# Altium footprint library Electromechanicals.PcbLib: 25 footprints (part 1 of 2)
Each footprint in its own frame and in the unit in brackets; x right, y up, seen from the top. Pads: shape width x height; smd on the part's side, far side on the other; paste and mask are expansions set on the pad; w line width, h text height; cw(c..) or ccw(c..) is an arc to the next point about the centre after c.
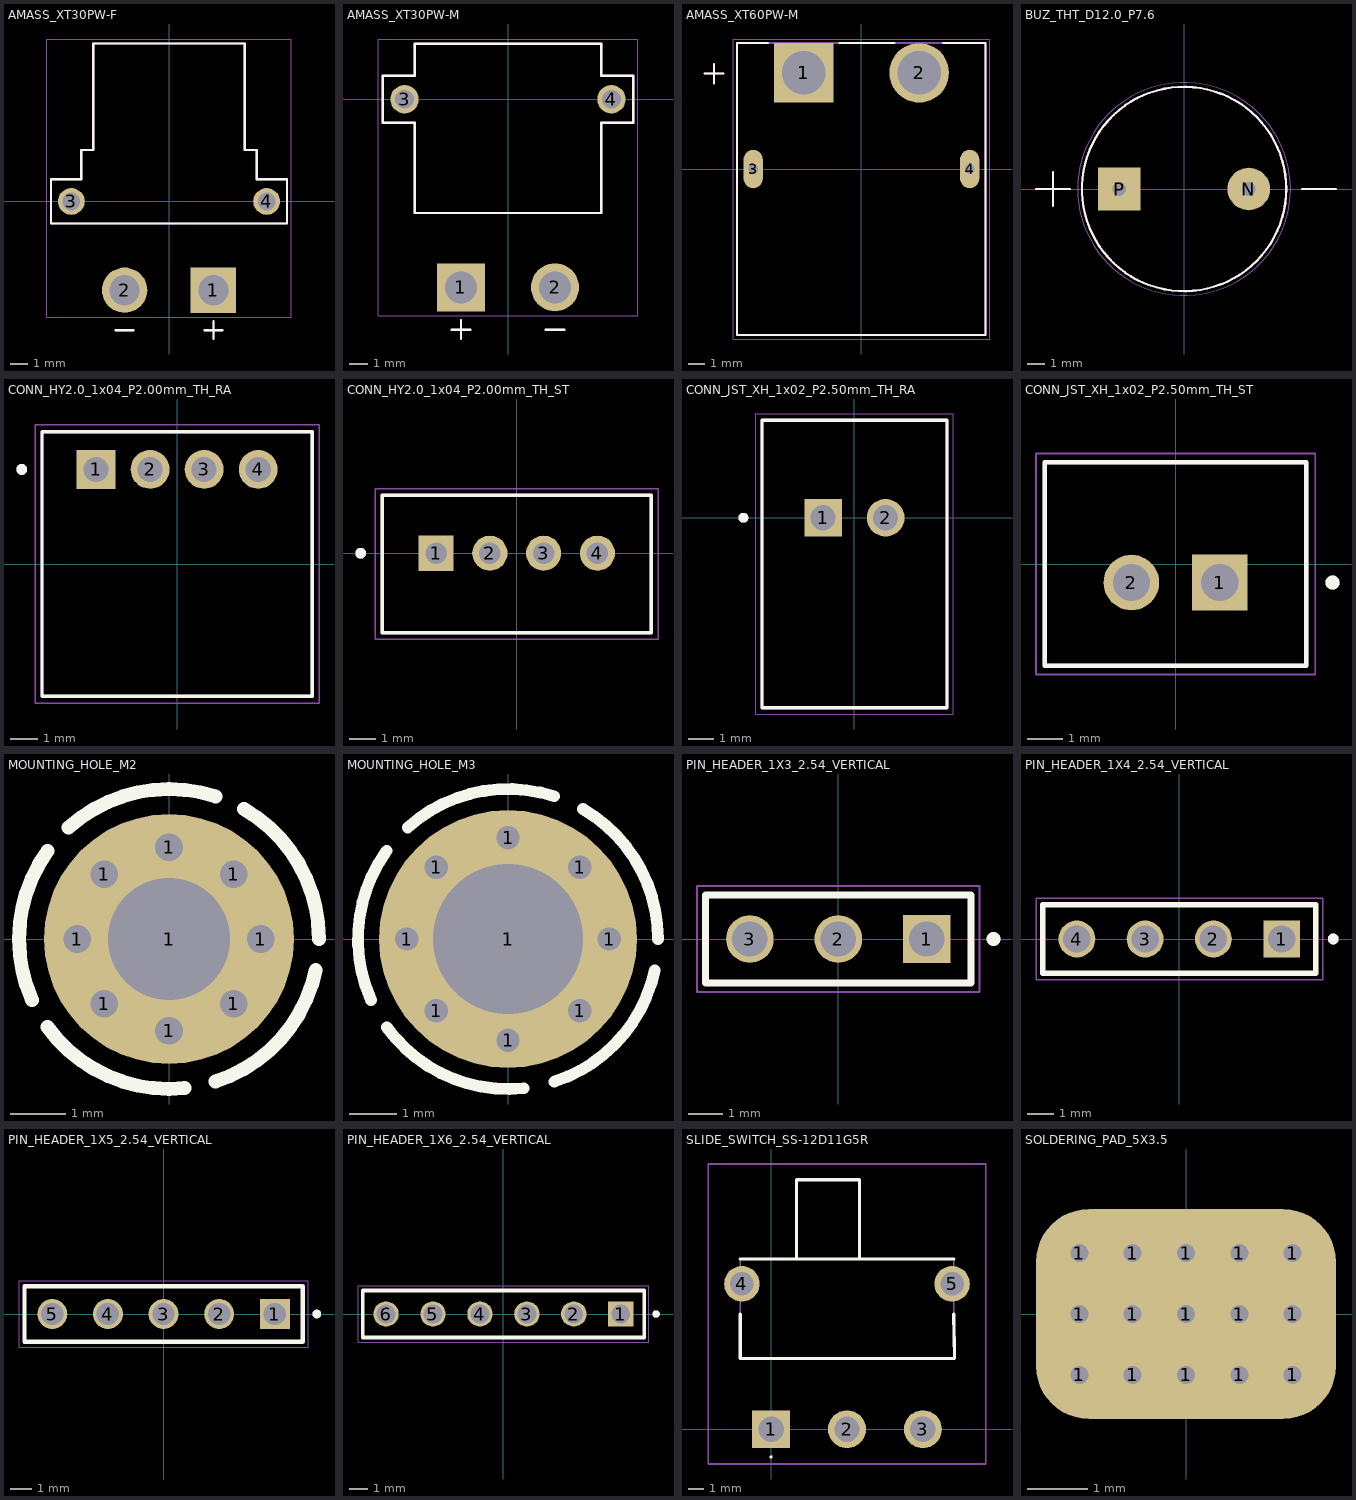
[diagram p0: the footprints below, top view; thin cyan lines are the x and y axes]

## AMASS_XT30PW-F [mm]
height 5
pads (4):
  rect 2.55x2.55 / inner round 2.55 / far side rect 2.55x2.55 hole 1.7: 1(2.5,-5)
  round 2.55 hole 1.7: 2(-2.5,-5)
  round 1.508 hole 1: 3(-5.5,0) 4(5.5,0)
Top Overlay:
  lines w0.127: -3,-7.25 -2,-7.25 ; 2,-7.25 3,-7.25 ; 2.5,-7.75 2.5,-6.75 ; -6.65,-1.25 6.65,-1.25 6.65,1.25 4.95,1.25 4.95,2.9 4.27,2.9 4.27,8.9 -4.27,8.9 -4.27,2.9 -4.95,2.9 -4.95,1.25 -6.65,1.25 -6.65,-1.25
Mechanical 13:
  lines w0.127: -3,-7.25 -2,-7.25 ; 2,-7.25 3,-7.25 ; 2.5,-7.75 2.5,-6.75 ; -6.65,-1.25 6.65,-1.25 6.65,1.25 4.95,1.25 4.95,2.9 4.27,2.9 4.27,8.9 -4.27,8.9 -4.27,2.9 -4.95,2.9 -4.95,1.25 -6.65,1.25 -6.65,-1.25
Mechanical 15:
  lines w0.05: -6.9,-6.525 6.9,-6.525 6.9,9.15 -6.9,9.15 -6.9,-6.525
3D body "step_temp.STEP": height 5, standoff -2, extent -6.65,-6 6.65,8.9

## AMASS_XT30PW-M [mm]
height 5
pads (4):
  rect 2.55x2.55 / inner round 2.55 / far side rect 2.55x2.55 hole 1.7: 1(-2.5,-10)
  round 2.55 hole 1.7: 2(2.5,-10)
  round 1.508 hole 1: 3(-5.5,0) 4(5.5,0)
Top Overlay:
  lines w0.127: -3,-12.25 -2,-12.25 ; -2.5,-12.75 -2.5,-11.75 ; 2,-12.25 3,-12.25 ; -6.65,-1.25 -6.65,1.25 -4.95,1.25 -4.95,2.95 4.95,2.95 4.95,1.25 6.65,1.25 6.65,-1.25 4.95,-1.25 4.95,-6.05 -4.95,-6.05 -4.95,-1.25 -6.65,-1.25
Top Designator:
  text ".Designator" at -7.618,-5.302 h1.52
Mechanical 13:
  lines w0.127: -3,-12.25 -2,-12.25 ; -2.5,-12.75 -2.5,-11.75 ; 2,-12.25 3,-12.25 ; -6.65,-1.25 -6.65,1.25 -4.95,1.25 -4.95,2.95 4.95,2.95 4.95,1.25 6.65,1.25 6.65,-1.25 4.95,-1.25 4.95,-6.05 -4.95,-6.05 -4.95,-1.25 -6.65,-1.25
Mechanical 15:
  lines w0.05: -6.9,-11.525 6.9,-11.525 6.9,3.2 -6.9,3.2 -6.9,-11.525
3D body "step_temp.STEP": height 5, standoff -2, extent -6.65,-11 6.65,2.95

## AMASS_XT60PW-M [mm]
height 8.4
pads (4):
  rect 3.716x3.716 / inner round 3.716 / far side rect 3.716x3.716 hole 2.7 mask+0.102: 1(-3.6,6)
  round 3.716 hole 2.7 mask+0.102: 2(3.6,6)
  oval 1.2x2.4 hole 0.6 square mask+0.102: 3(-6.75,0) 4(6.75,0)
Top Overlay:
  lines w0.127: -9.8,5.95 -8.6,5.95 ; -9.2,5.35 -9.2,6.55 ; -5.828,7.85 -7.75,7.85 -7.75,-10.35 7.75,-10.35 7.75,7.85 5.078,7.85 ; -1.372,7.85 2.072,7.85
Top Designator:
  text ".Designator" at -8.537,-1.753 h1.52
Mechanical 13:
  lines w0.127: -9.8,5.95 -8.6,5.95 ; -9.2,5.35 -9.2,6.55 ; -7.75,-10.35 7.75,-10.35 7.75,7.85 -7.75,7.85 -7.75,-10.35
Mechanical 15:
  lines w0.05: -8,-10.6 8,-10.6 8,8.11 -8,8.11 -8,-10.6
3D body "step_temp.STEP": height 8.4, standoff -2.55, extent -7.75,-10.35 7.75,7.85

## BUZ_THT_D12.0_P7.6 [mm]
height 10
pads (2):
  round 2.5 hole 0.8: N(3.8,0)
  rect 2.5x2.5 / inner round 2.5 / far side rect 2.5x2.5 hole 0.8: P(-3.8,0)
Top Overlay:
  circle w0.127: c0,0 r6
  lines w0.127: -8.69,0 -6.69,0 ; -7.69,-1 -7.69,1 ; 6.92,0 8.92,0
Mechanical 13:
  circle w0.127: c0,0 r6
  lines w0.127: -8.69,0 -6.69,0 ; -7.69,-1 -7.69,1 ; 6.92,0 8.92,0
Mechanical 15:
  circle w0.05: c0,0 r6.25
3D body "step_temp.STEP": height 9.51, standoff -4.49, extent -6,-5.995 6,5.995

## CONN_HY2.0_1x04_P2.00mm_TH_RA [mm]
height 5.1
pads (4):
  rect 1.438x1.438 / inner round 1.438 / far side rect 1.438x1.438 hole 0.93: 1(-3,3.5)
  round 1.438 hole 0.93: 2(-1,3.5) 3(1,3.5) 4(3,3.5)
Top Overlay:
  circle w0.2: c-5.75,3.5 r0.1
  lines w0.127: -5,-4.9 -5,4.9 5,4.9 5,-4.9 -5,-4.9
Mechanical 13:
  circle w0.2: c-5.75,3.5 r0.1
  lines w0.127: -5,-4.9 -5,4.9 5,4.9 5,-4.9 -5,-4.9
Mechanical 15:
  lines w0.05: -5.25,-5.15 5.25,-5.15 5.25,5.15 -5.25,5.15 -5.25,-5.15

## CONN_HY2.0_1x04_P2.00mm_TH_ST [mm]
height 8.1
pads (4):
  rect 1.308x1.308 / inner round 1.308 / far side rect 1.308x1.308 hole 0.8: 1(-3,0)
  round 1.308 hole 0.8: 2(-1,0) 3(1,0) 4(3,0)
Top Overlay:
  circle w0.2: c-5.8,0 r0.1
  lines w0.127: -5,-2.95 -5,2.15 5,2.15 5,-2.95 -5,-2.95
Mechanical 13:
  circle w0.2: c-5.8,0 r0.1
  lines w0.127: -5,-2.95 -5,2.15 5,2.15 5,-2.95 -5,-2.95
Mechanical 15:
  lines w0.05: -5.25,-3.2 -5.25,2.4 5.25,2.4 5.25,-3.2 -5.25,-3.2
3D body "step_temp.STEP": height 8.1, standoff -3.5, extent -5,-2.95 5,2.15

## CONN_JST_XH_1x02_P2.50mm_TH_RA [mm]
height 6.1
pads (2):
  rect 1.508x1.508 / inner round 1.508 / far side rect 1.508x1.508 hole 1: 1(-1.25,0)
  round 1.508 hole 1: 2(1.25,0)
Top Overlay:
  circle w0.2: c-4.44,0 r0.1
  lines w0.127: -3.7,-7.6 -3.7,3.9 3.7,3.9 3.7,-7.6 -3.7,-7.6
Mechanical 13:
  circle w0.2: c-4.44,0 r0.1
  lines w0.127: -3.7,-7.6 -3.7,3.9 3.7,3.9 3.7,-7.6 -3.7,-7.6
Mechanical 15:
  lines w0.05: -3.95,-7.85 3.95,-7.85 3.95,4.15 -3.95,4.15 -3.95,-7.85
3D body "step_temp.STEP": height 6.1, standoff -3.4, extent -3.7,-7.6 3.7,3.9

## CONN_JST_XH_1x02_P2.50mm_TH_ST [mm]
height 7
pads (2):
  rect 1.575x1.575 / inner round 1.575 / far side rect 1.575x1.575 hole 1.05: 1(1.25,-0.525)
  round 1.575 hole 1.05: 2(-1.25,-0.525)
Top Overlay:
  circle w0.2: c4.44,-0.525 r0.1
  lines w0.127: -3.7,-2.875 3.7,-2.875 3.7,2.875 -3.7,2.875 -3.7,-2.875
Mechanical 13:
  circle w0.2: c4.44,-0.525 r0.1
  lines w0.127: -3.7,-2.875 3.7,-2.875 3.7,2.875 -3.7,2.875 -3.7,-2.875
Mechanical 15:
  lines w0.05: -3.95,-3.125 -3.95,3.125 3.95,3.125 3.95,-3.125 -3.95,-3.125

## MOUNTING_HOLE_M2 [mm]
pads (9):
  round 0.5 hole 0.5: 1(-1.651,0) 1(-1.167,-1.167) 1(-1.167,1.167) 1(0,-1.651) 1(0,1.651) 1(1.167,-1.167) 1(1.167,1.167) 1(1.651,0)
  round 4.5 hole 2.2 mask-2539.97: 1(0,0)
Top Overlay:
  lines w0.25: -2.467,-1.098 cw(c0,0) -2.184,1.587 ; -2.184,-1.587 ccw(c0,0) 0.282,-2.685 ; -1.807,2.006 cw(c0,0) 0.834,2.568 ; 0.834,-2.568 ccw(c0,0) 2.641,-0.561 ; 1.35,2.338 cw(c0,0) 2.7,0
Top Solder:
  circle w2.375: c0,0 r1.187
Bottom Solder:
  circle w2.375: c0,0 r1.187

## MOUNTING_HOLE_M3 [mm]
pads (9):
  round 0.5 hole 0.5: 1(-2.159,0) 1(-1.527,-1.527) 1(-1.527,1.527) 1(0,-2.159) 1(0,2.159) 1(1.527,-1.527) 1(1.527,1.527) 1(2.159,0)
  round 5.5 hole 3.2 mask-2539.97: 1(0,0)
Top Overlay:
  lines w0.25: -2.923,-1.302 cw(c0,0) -2.589,1.881 ; -2.589,-1.881 ccw(c0,0) 0.334,-3.182 ; -2.141,2.378 cw(c0,0) 0.989,3.043 ; 0.989,-3.043 ccw(c0,0) 3.13,-0.665 ; 1.6,2.771 cw(c0,0) 3.2,0
Top Solder:
  circle w2.875: c0,0 r1.438
Bottom Solder:
  circle w2.875: c0,0 r1.438

## PIN_HEADER_1X3_2.54_VERTICAL [mm]
pads (3):
  rect 1.37x1.37 / inner round 1.37 / far side rect 1.37x1.37 hole 1.02: 1(2.54,0)
  round 1.37 hole 1.02: 2(0,0) 3(-2.54,0)
Top Overlay:
  circle w0.2: c4.46,0 r0.1
  lines w0.2: -3.81,-1.27 -3.81,1.27 3.81,1.27 3.81,-1.27 -3.81,-1.27
Mechanical 13:
  circle w0.2: c4.46,0 r0.1
  lines w0.1: -3.81,-1.27 -3.81,1.27 ; -3.81,-1.27 3.81,-1.27 ; -3.81,-1.27 -3.81,1.27 ; -3.81,1.27 3.81,1.27 ; -3.81,1.27 3.81,1.27 ; 3.81,-1.27 3.81,1.27 ; 3.81,-1.27 3.81,1.27
Mechanical 15:
  lines w0.05: -4.06,-1.52 -4.06,1.52 4.06,1.52 4.06,-1.52 -4.06,-1.52

## PIN_HEADER_1X4_2.54_VERTICAL [mm]
pads (4):
  rect 1.37x1.37 / inner round 1.37 / far side rect 1.37x1.37 hole 1.02: 1(3.81,0)
  round 1.37 hole 1.02: 2(1.27,0) 3(-1.27,0) 4(-3.81,0)
Top Overlay:
  circle w0.2: c5.73,0 r0.1
  lines w0.2: -5.08,-1.27 -5.08,1.27 5.08,1.27 5.08,-1.27 -5.08,-1.27
Mechanical 13:
  circle w0.2: c5.73,0 r0.1
  lines w0.1: -5.08,-1.27 -5.08,1.27 ; -5.08,-1.27 5.08,-1.27 ; -5.08,-1.27 -5.08,1.27 ; -5.08,1.27 5.08,1.27 ; -5.08,1.27 5.08,1.27 ; 5.08,-1.27 5.08,1.27 ; 5.08,-1.27 5.08,1.27
Mechanical 15:
  lines w0.05: -5.33,-1.52 -5.33,1.52 5.33,1.52 5.33,-1.52 -5.33,-1.52

## PIN_HEADER_1X5_2.54_VERTICAL [mm]
pads (5):
  rect 1.37x1.37 / inner round 1.37 / far side rect 1.37x1.37 hole 1.02: 1(5.08,0)
  round 1.37 hole 1.02: 2(2.54,0) 3(0,0) 4(-2.54,0) 5(-5.08,0)
Top Overlay:
  circle w0.2: c7,0 r0.1
  lines w0.2: -6.35,-1.27 6.35,-1.27 6.35,1.27 -6.35,1.27 -6.35,-1.27
Mechanical 13:
  circle w0.2: c7,0 r0.1
  lines w0.1: -6.35,-1.27 -6.35,1.27 ; -6.35,-1.27 6.35,-1.27 ; -6.35,-1.27 -6.35,1.27 ; -6.35,1.27 6.35,1.27 ; -6.35,1.27 6.35,1.27 ; 6.35,-1.27 6.35,1.27 ; 6.35,-1.27 6.35,1.27
Mechanical 15:
  lines w0.05: -6.6,-1.52 6.6,-1.52 6.6,1.52 -6.6,1.52 -6.6,-1.52

## PIN_HEADER_1X6_2.54_VERTICAL [mm]
pads (6):
  rect 1.37x1.37 / inner round 1.37 / far side rect 1.37x1.37 hole 1.02: 1(6.35,0)
  round 1.37 hole 1.02: 2(3.81,0) 3(1.27,0) 4(-1.27,0) 5(-3.81,0) 6(-6.35,0)
Top Overlay:
  circle w0.2: c8.27,0 r0.1
  lines w0.2: -7.62,-1.27 7.62,-1.27 7.62,1.27 -7.62,1.27 -7.62,-1.27
Mechanical 13:
  circle w0.2: c8.27,0 r0.1
  lines w0.1: -7.62,-1.27 -7.62,1.27 ; -7.62,-1.27 7.62,-1.27 ; -7.62,-1.27 -7.62,1.27 ; -7.62,1.27 7.62,1.27 ; -7.62,1.27 7.62,1.27 ; 7.62,-1.27 7.62,1.27 ; 7.62,-1.27 7.62,1.27
Mechanical 15:
  lines w0.05: -7.87,-1.52 7.87,-1.52 7.87,1.52 -7.87,1.52 -7.87,-1.52

## SLIDE_SWITCH_SS-12D11G5R [mm]
pads (5):
  rect 2.4x2.4 hole 1.6: 1(0,0)
  round 2.4 hole 1.6: 2(4.8,0) 3(9.6,0)
  round 2.25 hole 1.5: 4(-1.85,9.2) 5(11.45,9.2)
Top Overlay:
  lines w0.1: 0,-1.8 ccw(c0,-1.75) 0,-1.7 ccw(c0,-1.75) 0,-1.8
  lines w0.2: -1.95,7.28 -1.95,4.48 11.6,4.48 11.55,7.28 ; -1.95,10.78 11.55,10.78 ; 1.6,10.78 1.6,15.78 5.6,15.78 5.6,10.78
Top Designator:
  text ".Designator" at -2.818,6.782 h1.52
Mechanical 13:
  lines w0.1: 1.6,10.78 1.6,15.78 5.6,15.78 5.6,10.78 ; -1.95,4.48 11.55,4.48 11.55,10.78 -1.95,10.78 -1.95,4.48
Mechanical 15:
  lines w0.1: -3.975,-2.2 13.575,-2.2 13.575,16.78 -3.975,16.78 -3.975,-2.2
3D body "SS-12D11G5R.stp": height 6.93, standoff -2.86, extent -1.953,-0.663 11.546,15.787

## SOLDERING_PAD_5X3.5 [mm]
pads (16):
  round 0.6 hole 0.3 mask+0: 1(-1.778,-1.016) 1(-1.778,0) 1(-1.778,1.016) 1(-0.889,-1.016) 1(-0.889,0) 1(-0.889,1.016) 1(0,-1.016) 1(0,0) 1(0,1.016) 1(0.889,-1.016) 1(0.889,0) 1(0.889,1.016) 1(1.778,-1.016) 1(1.778,0) 1(1.778,1.016)
  rrect50% 5x3.5 smd paste-2539.97 mask+0.1: 1(0,0)